# Altium footprint library Jump.PcbLib: 12 footprints
Each footprint in its own frame and in the unit in brackets; x right, y up, seen from the top. Pads: shape width x height; smd on the part's side, far side on the other; paste and mask are expansions set on the pad; w line width, h text height; cw(c..) or ccw(c..) is an arc to the next point about the centre after c.
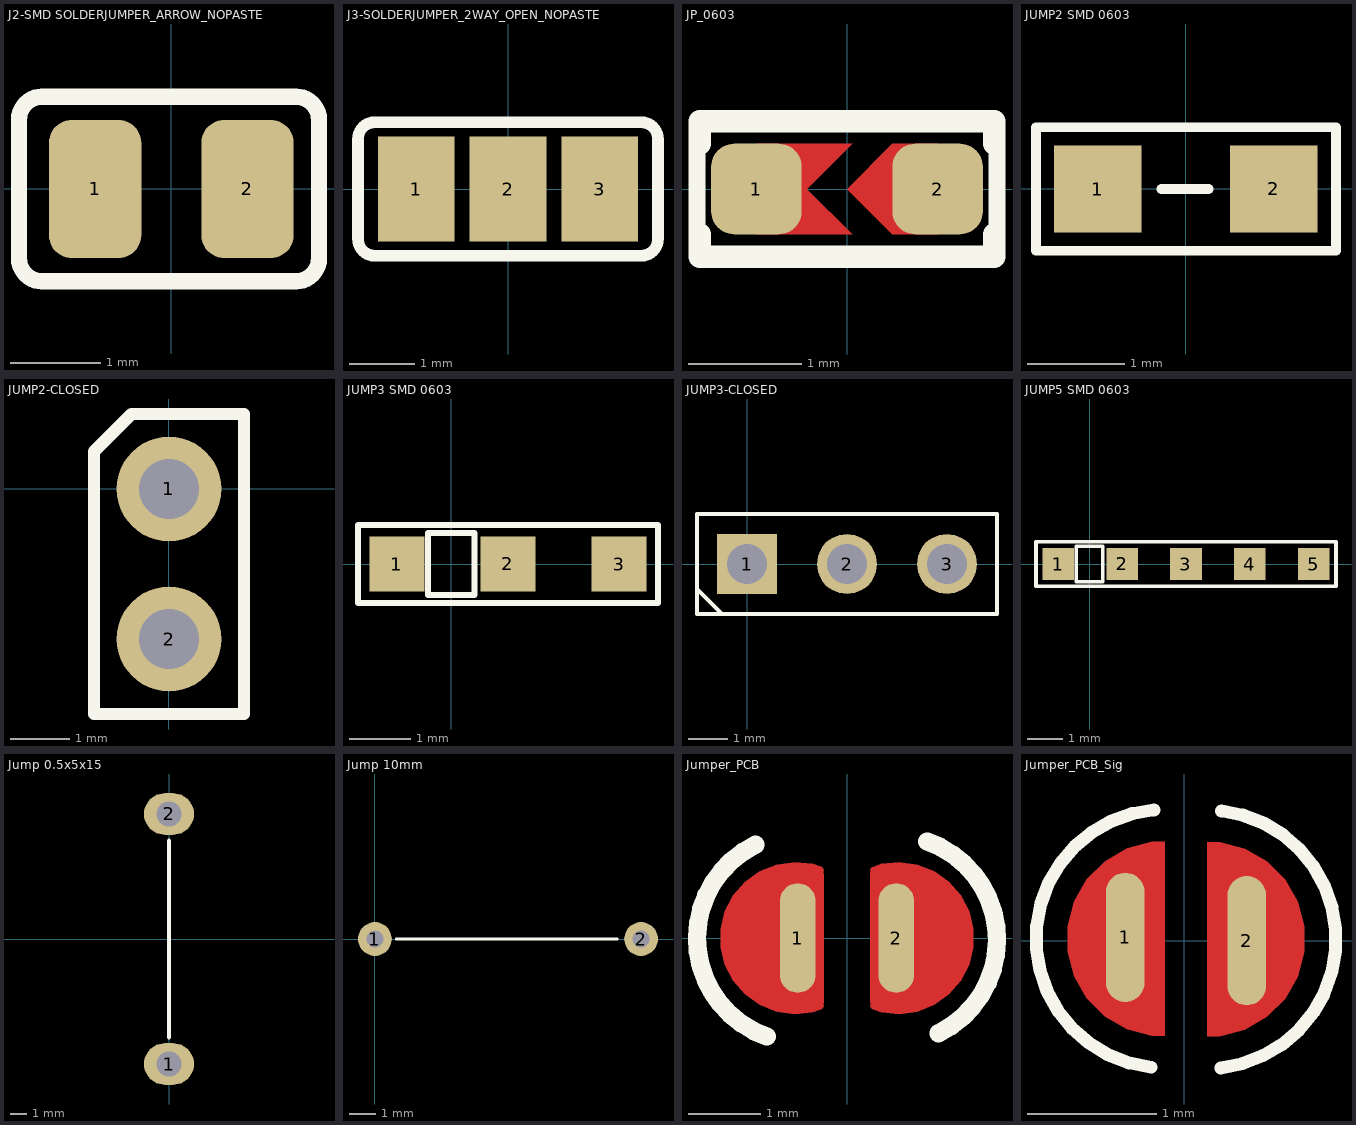
[diagram p0: the footprints below, top view; thin cyan lines are the x and y axes]

## J2-SMD SOLDERJUMPER_ARROW_NOPASTE [mil]
pads (2):
  rrect50% 40x60 smd: 1(-33,0) 2(33,0)
Top Overlay:
  lines w7: -66,-30 ccw(c-56,-30) -56,-40 54,-40 ccw(c54,-30) 64,-30 64,30 ccw(c54,30) 54,40 -56,40 ccw(c-56,30) -66,30 -66,-30
Top Designator:
  text ".Designator" at -147.08,-13.54 h60

## J3-SOLDERJUMPER_2WAY_OPEN_NOPASTE [mil]
pads (3):
  rect 46x63 smd: 1(-55,0) 2(0,0) 3(55,0)
Top Overlay:
  lines w7: -90,-30 ccw(c-80,-30) -80,-40 80,-40 ccw(c80,-30) 90,-30 90,30 ccw(c80,30) 80,40 -80,40 ccw(c-80,30) -90,30 -90,-30
Top Designator:
  text ".Designator" at -146.08,-13.54 h60

## JP_0603 [mm] "CHIP Resistor 1/10 WATT, 1.6x0.8mm, 0603, 1608"
height 0.6
pads (2):
  rrect50% 0.8x0.8 smd paste-3 mask+0.05: 1(-0.8,0) 2(0.8,0)
Top Layer:
  region: -0.8,0.4 0.044,0.4 -0.356,0 0.044,-0.4 -0.8,-0.4
  region: 0.4,0.4 0,0 0.4,-0.4 0.8,-0.4 0.8,0.4
Top Overlay:
  lines w0.15: -1.325,-0.4 -1.325,0.4 ; 1.325,-0.4 1.325,0.4
  lines w0.2: -1.3,-0.6 -1.3,-0.4 ; -1.3,0.4 -1.3,0.6 ; -1.295,-0.6 1.3,-0.6 1.3,-0.4 ; -1.295,0.6 1.3,0.6 1.3,0.4
Top Solder:
  region: -0.9,-0.45 -0.9,0.449 0.9,0.449 0.9,-0.45
Top Designator:
  text ".Designator" at -3.71,-0.344 h1.52

## JUMP2 SMD 0603 [mm]
pads (2):
  rect 0.9x0.9 smd: 1(-0.908,0) 2(0.908,0)
Top Overlay:
  lines w0.1: -0.254,0 0.235,0 ; -1.543,-0.635 0.87,-0.635 1.547,-0.635 1.547,0.635 -1.543,0.635 -1.543,-0.635
Top Designator:
  text ".Designator" at -3.708,-0.344 h1.52

## JUMP2-CLOSED [mil]
pads (2):
  round 70 hole 40: 1(0,0) 2(0,-100)
Top Overlay:
  lines w8: -50,-150 50,-150 50,50 -25,50 -50,25 -50,-150
Top Designator:
  text ".Designator" at -146.08,-63.54 h60
3D body: height 300, standoff -120, extent -15,-115.25 15,-85.25
3D body: height 300, standoff -120, extent -15,-15.25 15,14.75
3D body: height 220, standoff 100, extent -48,-152 48,48
3D body: height 250, standoff 220, extent -41,-144 40,39.5
3D body: height 280, standoff 250, extent -48,-152 48,48
3D body: height 100, standoff 0, extent -50,-150.43 50,50

## JUMP3 SMD 0603 [mm]
pads (3):
  rect 0.9x0.9 smd: 1(-0.889,0) 2(0.927,0) 3(2.743,0)
Top Overlay:
  lines w0.1: -1.524,-0.635 0.889,-0.635 3.378,-0.635 3.378,0.635 -1.524,0.635 -1.524,-0.635 ; -0.381,-0.508 0.381,-0.508 0.381,0.508 -0.381,0.508 -0.381,-0.508
Top Designator:
  text ".Designator" at -2.783,-0.344 h1.52
3D body "User Library-SMD RESISTOR-1 (3).step": height 0.43, standoff -0.03, extent -0.8,-0.4 0.8,0.4

## JUMP3-CLOSED [mil]
pads (3):
  rect 60x60 hole 40: 1(0,0)
  round 60 hole 40: 2(100,0) 3(200,0)
Top Overlay:
  lines w4: -50,-25 -50,-50 -25,-50 ; -50,-25 -25,-50 ; -50,-25 -50,50 250,50 250,-50 -25,-50
Top Designator:
  text ".Designator" at -46.08,-13.54 h60
3D body: height 300, standoff -120, extent -15,-15.25 15,14.75
3D body: height 300, standoff -120, extent 85,-15.25 115,14.75
3D body: height 300, standoff -120, extent 185,-15 215,15
3D body: height 220, standoff 100, extent -52,-48 148,48
3D body: height 250, standoff 220, extent -44,-40 139.5,41
3D body: height 280, standoff 250, extent -52,-48 148,48
3D body: height 100, standoff 0, extent -49.93,-50 250,50

## JUMP5 SMD 0603 [mm]
pads (5):
  rect 0.9x0.9 smd: 1(-0.889,0) 2(0.927,0) 3(2.743,0) 4(4.559,0) 5(6.375,0)
Top Overlay:
  lines w0.1: -1.524,-0.635 0.889,-0.635 7.01,-0.635 7.01,0.635 -1.524,0.635 -1.524,-0.635 ; -0.381,-0.508 0.381,-0.508 0.381,0.508 -0.381,0.508 -0.381,-0.508
Top Designator:
  text ".Designator" at -0.967,-0.344 h1.52
3D body "User Library-SMD RESISTOR-1 (3).step": height 0.43, standoff -0.03, extent -0.8,-0.4 0.8,0.4

## Jump 0.5x5x15 [mm]
pads (2):
  oval 3x2.5 hole 1.5: 1(0,-7.5) 2(0,7.5)
Top Overlay:
  lines w0.254: 0,-5.9 0,5.9
Top Designator:
  text ".Designator" at -3.71,-0.344 h1.52

## Jump 10mm [mm]
pads (2):
  round 1.27 hole 0.635: 1(0,0) 2(10,0)
Top Overlay:
  lines w0.1: 0.8,0 9.1,0
Top Designator:
  text ".Designator" at 1.29,-0.344 h1.52
3D body: height 0.85, standoff 0.15, extent 0,-0.35 10.16,0.35
3D body: height 0.5, standoff -2, extent 9.81,-0.35 10.51,0.35
3D body: height 0.85, standoff 0.15, extent 9.81,-0.35 10.51,0.35
3D body: height 0.5, standoff -2, extent -0.35,-0.35 0.35,0.35
3D body: height 0.85, standoff 0.15, extent -0.35,-0.35 0.35,0.35

## Jumper_PCB [mil]
pads (2):
  oval 19.68x60 smd: 1(-27,0) 2(27,0)
Top Layer:
  region: -14.16,-38.97 -18.84,-40.63 -28.71,-41.64 -38.55,-40.29 -47.79,-36.65 -55.9,-30.93 -62.43,-23.44 -67,-14.63 -69.35,-4.98 -69.36,4.94 -67.01,14.59 -62.45,23.41 -55.93,30.9 -47.82,36.63 -38.59,40.28 -28.75,41.64 -18.87,40.64 -14.19,38.98 -13.9,38.88 -13.41,38.51 -13.06,38 -12.87,37.42 -12.87,37.11 -12.87,36.99 -12.9,36.74 -12.97,36.49 -13.06,36.26 -13.12,36.15 -13.06,36.04 -12.97,35.81 -12.9,35.57 -12.87,35.32 -12.87,35.19 -12.87,-35.67 -12.87,-35.76 -12.89,-35.93 -12.92,-36.1 -12.96,-36.26 -12.99,-36.34 -12.95,-36.43 -12.89,-36.62 -12.86,-36.81 -12.84,-37 -12.84,-37.1 -12.84,-37.41 -13.02,-37.99 -13.38,-38.49 -13.87,-38.87
  region: 14.16,38.97 18.84,40.63 28.71,41.64 38.55,40.29 47.79,36.65 55.9,30.93 62.43,23.44 67,14.63 69.35,4.98 69.36,-4.94 67.01,-14.59 62.45,-23.41 55.93,-30.9 47.82,-36.63 38.59,-40.28 28.75,-41.64 18.87,-40.64 14.19,-38.98 13.9,-38.88 13.41,-38.51 13.06,-38 12.87,-37.42 12.87,-37.11 12.87,-36.99 12.9,-36.74 12.97,-36.49 13.06,-36.26 13.12,-36.15 13.06,-36.04 12.97,-35.81 12.9,-35.57 12.87,-35.32 12.87,-35.19 12.87,35.67 12.87,35.76 12.89,35.93 12.92,36.1 12.96,36.26 12.99,36.34 12.95,36.43 12.89,36.62 12.86,36.81 12.84,37 12.84,37.1 12.84,37.41 13.02,37.99 13.38,38.49 13.87,38.87
Top Overlay:
  lines w10: -50.14,51.23 ccw(c-25.17,-0.1) -44.02,-53.99 ; 44.02,52.99 cw(c25.17,-0.9) 50.14,-52.23
Top Designator:
  text ".Designator" at -146.08,-14.04 h60

## Jumper_PCB_Sig [mm]
pads (2):
  oval 0.3x1 smd: 1(-0.457,0.025) 2(0.483,0)
Top Layer:
  region: 0.178,0.762 0.277,0.762 0.467,0.711 0.638,0.612 0.778,0.473 0.877,0.301 0.928,0.111 0.928,-0.087 0.877,-0.277 0.778,-0.449 0.638,-0.588 0.467,-0.687 0.277,-0.738 0.178,-0.738
  region: -0.152,-0.737 -0.251,-0.737 -0.442,-0.685 -0.613,-0.587 -0.753,-0.447 -0.851,-0.276 -0.902,-0.085 -0.902,0.112 -0.851,0.303 -0.753,0.474 -0.613,0.614 -0.442,0.712 -0.251,0.763 -0.152,0.763
Top Overlay:
  lines w0.1: -0.258,-0.979 cw(c-0.147,0.015) -0.235,1.011 ; 0.281,-0.984 ccw(c0.172,0.01) 0.287,1.004
Top Designator:
  text ".Designator" at -3.698,-0.33 h1.52